# Altium schematic symbol library BIblioteka.SchLib: 66 symbols (part 2 of 3)
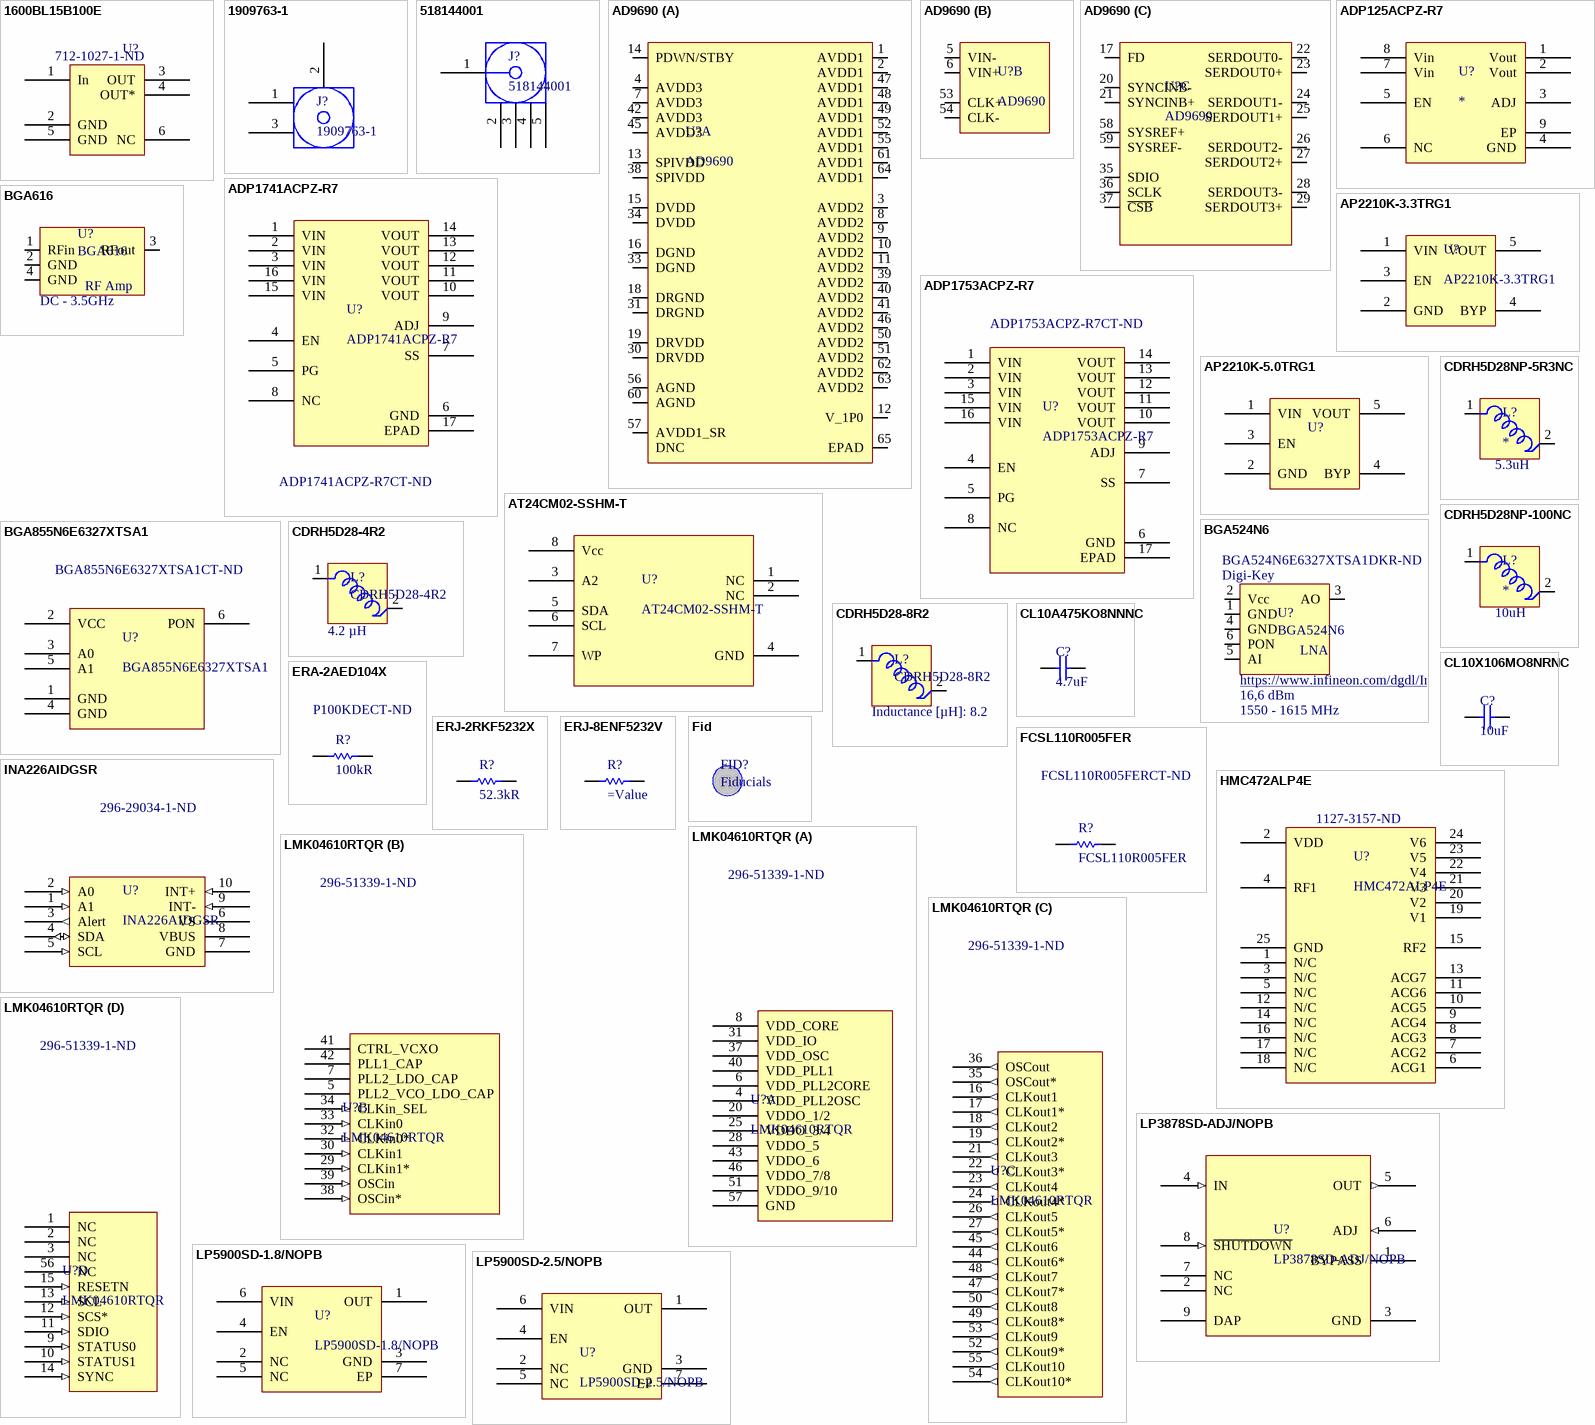
[diagram p3: symbols 1600BL15B100E to LP5900SD-2.5/NOPB]

## LP5900SD-1.8/NOPB
designator U?
Ultra Low Noise, 150MA Linear Regulator For Rf/analog Circuits, 6 Pin Llp; Manufacturer 1: Texas Instruments; Output Voltage: 1.8V; Min Input Voltage: 2.5V; Max Input Voltage: 5.5V; Dropout Voltage: 150mV; Number of Outputs: 1; Polarity: Positive; Quiescent Current: 50uA; Output Voltage Accuracy: 2%; Output Type: Fixed; Supplier 1: Digi-Key; Manufacturer Part Number 1: LP5900SD-1.8/NOPB; Stock 1: 10846; Pricing 1: 1=0.77000, 10=0.68000, 100=0.52120, 500=0.41200 (USD); RoHS: Yes; Mount: Surface Mount; Number of Pins: 6; Min Operating Temperature: -40°C; Max Operating Temperature: 125°C; Output Current: 150mA; Package Quantity: 1000; Nominal Output Voltage: 1.8V; Packaging: Tape and Reel; Max Output Current: 150mA; Accuracy: 2%; Length: 2.2mm; Height: 0.8mm; Width: 2.5mm; Radiation Hardening: No; REACH SVHC: No SVHC; Lead Free: Lead Free; ComponentLink1URL: https://datasheet.ciiva.com/6598/lp5900-6598182.pdf?src-supplier=Digi-Key; ComponentLink1Description: https://datasheet.ciiva.com/6598/lp5900-6598182.pdf?src-supplier=Digi-Key; ComponentLink2URL: https://datasheet.ciiva.com/6598/lp5900-6598185.pdf?src-supplier=Digi-Key; ComponentLink2Description: https://datasheet.ciiva.com/6598/lp5900-6598185.pdf?src-supplier=Digi-Key; ComponentLink3URL: https://datasheet.ciiva.com/26175/lp5900-26175289.pdf?src-supplier=Avnet+Europe; ComponentLink3Description: https://datasheet.ciiva.com/26175/lp5900-26175289.pdf?src-supplier=Avnet+Europe; ComponentLink4URL: https://datasheet.ciiva.com/6598/lp5900-6598187.pdf?src-supplier=Digi-Key; ComponentLink4Description: https://datasheet.ciiva.com/6598/lp5900-6598187.pdf?src-supplier=Digi-Key; ComponentLink5URL: https://datasheet.ciiva.com/28643/1772310-28643116.pdf?src-supplier=Element14; ComponentLink5Description: https://datasheet.ciiva.com/28643/1772310-28643116.pdf?src-supplier=Element14; ComponentLink6URL: https://datasheet.ciiva.com/14278/lp5900-14278125.pdf?src-supplier=Avnet; ComponentLink6Description: https://datasheet.ciiva.com/14278/lp5900-14278125.pdf?src-supplier=Avnet; ComponentLink7URL: https://datasheet.ciiva.com/22678/1772310-22678013.pdf?src-supplier=Element14; ComponentLink7Description: https://datasheet.ciiva.com/22678/1772310-22678013.pdf?src-supplier=Element14; Supplier Part Number 1: LP5900SD-1.8/NOPBCT-ND
footprint LP5900 (PSON, 6-Leads, Body 2.10x2.50mm, Pitch 0.65mm, Thermal Pad 1.20x0.75mm, IPC High Density)
pins: 1 OUT, 2 NC, 3 GND, 4 EN, 5 NC, 6 VIN, 7 EP

## LP5900SD-2.5/NOPB
designator U?
TEXAS INSTRUMENTS   LP5900SD-2.5/NOPB   LDO, FIXED, 2.5V, 0.15A, WSON-6; Output Current: 150mA; Max Input Voltage: 5.5V; Dropout Voltage: 80mV; Number of Outputs: 1; Polarity: Positive; Quiescent Current: 50uA; Accuracy: 2%; Supplier 1: Digi-Key; Manufacturer 1: Texas Instruments; Manufacturer Part Number 1: LP5900SD-2.5/NOPB; Stock 1: 11364; Pricing 1: 1=0.77000, 10=0.68000, 100=0.52120, 500=0.41200 (USD); RoHS: Yes; Mount: Surface Mount; Number of Pins: 6; Contact Plating: Tin; Min Operating Temperature: -40°C; Max Operating Temperature: 125°C; Output Voltage: 2.5V; Nominal Output Voltage: 2.5V; Min Input Voltage: 2.5V; Packaging: Tape and Reel; Max Output Current: 150mA; Output Voltage Accuracy: 2%; Output Type: Fixed; Length: 2.2mm; Height: 0.8mm; Width: 2.5mm; REACH SVHC: No SVHC; Lead Free: Lead Free; ComponentLink1URL: https://datasheet.ciiva.com/49046/1896251-49046519.pdf?src-supplier=Element14; ComponentLink1Description: https://datasheet.ciiva.com/49046/1896251-49046519.pdf?src-supplier=Element14; Supplier Part Number 1: LP5900SD-2.5/NOPBCT-ND
footprint LP5900 (PSON, 6-Leads, Body 2.10x2.50mm, Pitch 0.65mm, Thermal Pad 1.20x0.75mm, IPC High Density)
pins: 1 OUT, 2 NC, 3 GND, 4 EN, 5 NC, 6 VIN, 7 EP

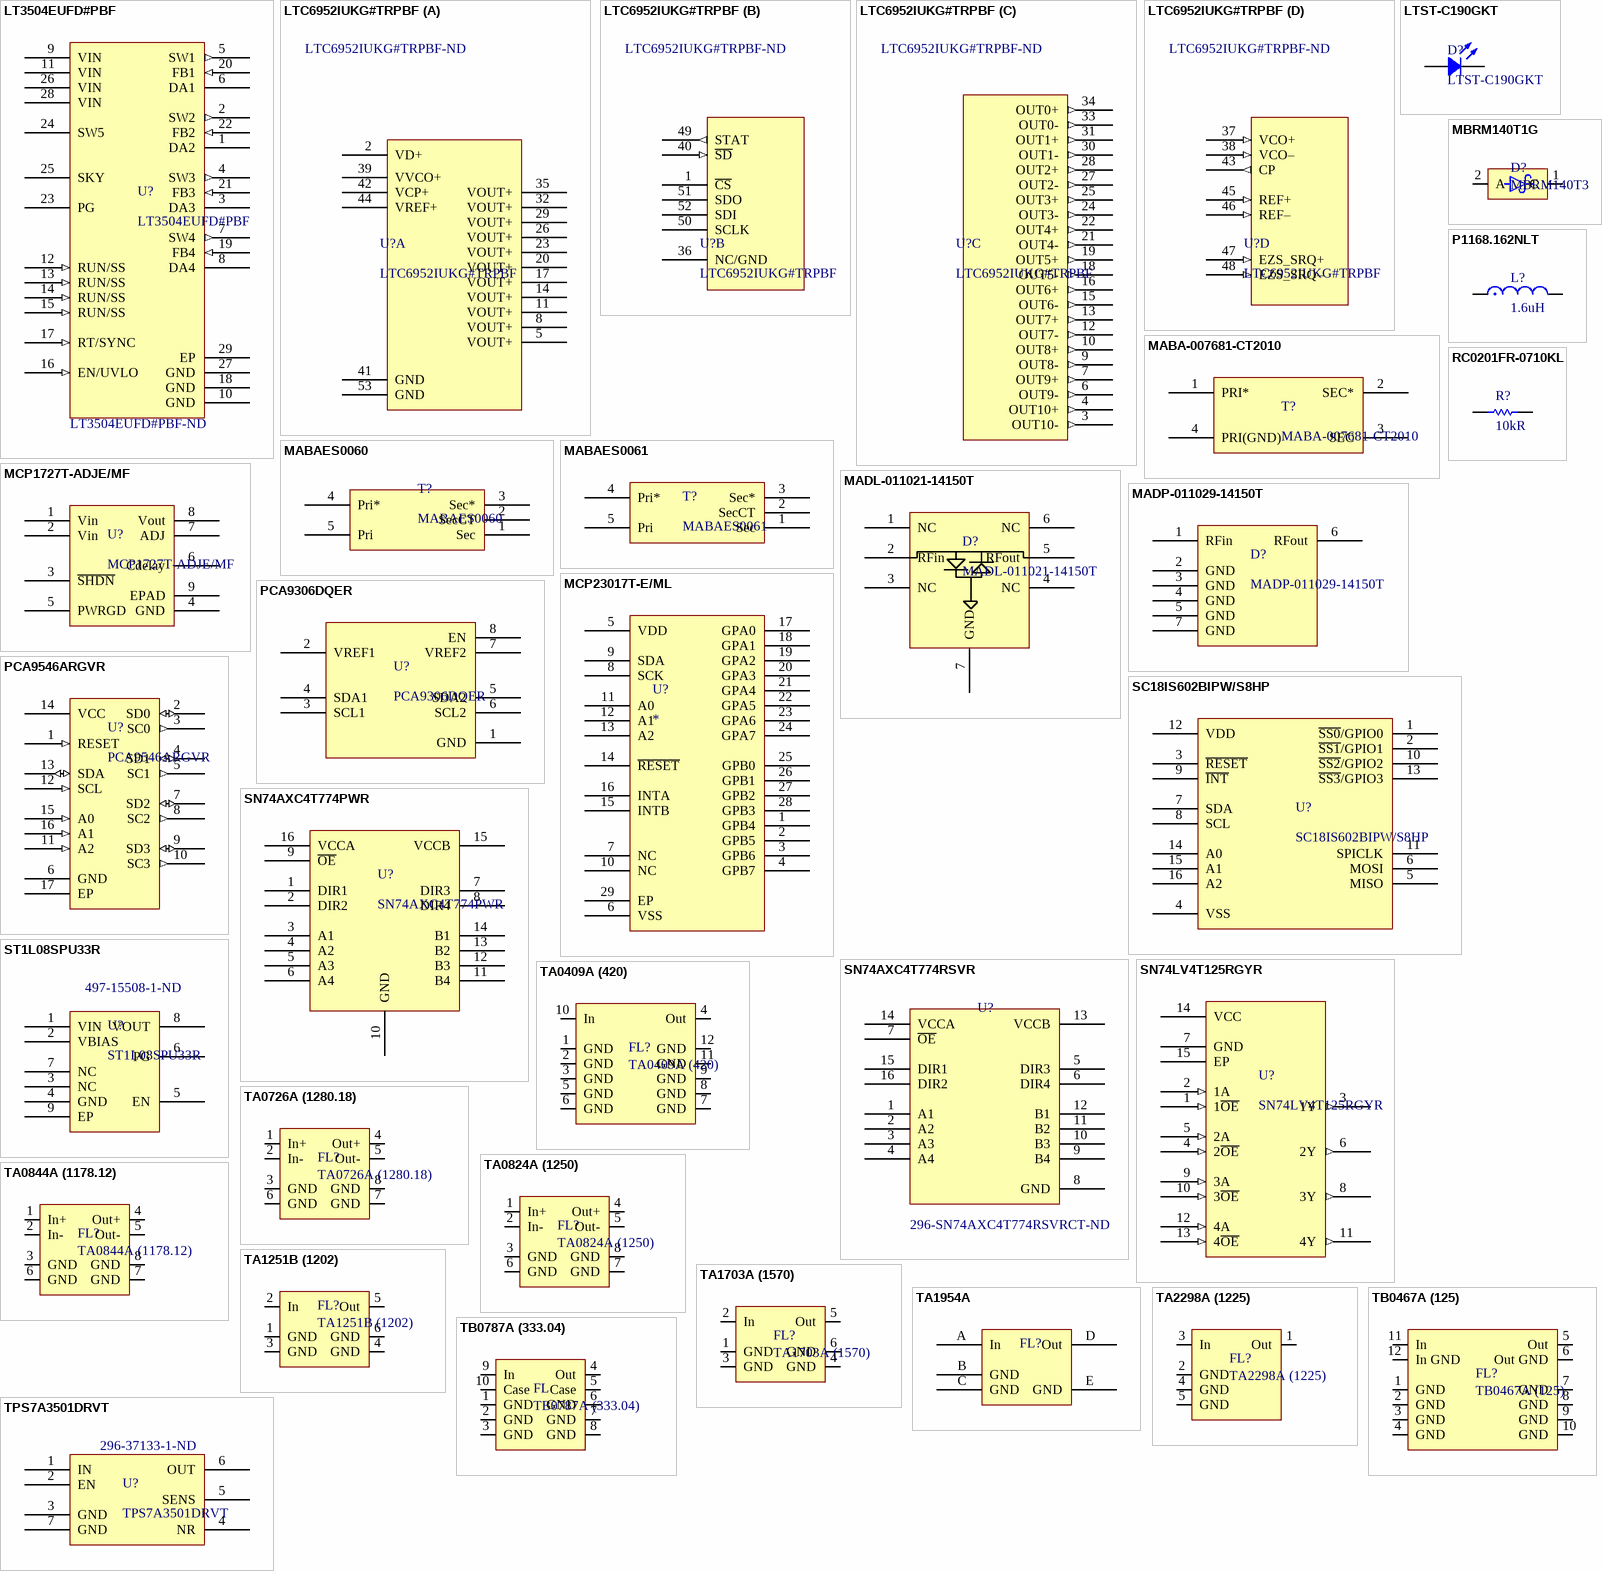
[diagram p1: symbols LT3504EUFD#PBF to TPS7A3501DRVT]

## LT3504EUFD#PBF
designator U?  Supplier Part Number 1: LT3504EUFD#PBF-ND
LINEAR TECHNOLOGY         LT3504EUFD#PBF             BUCK, QUAD, 3.2/40V, 1A, 2.2MHZ, 28QFN; Manufacturer: Analog Devices / Linear Technology; Output Voltage: 40V; Min Input Voltage: 3.2V; Number of Outputs: 4; Switching Frequency: 2.1MHz; Synchronous Rectifier: No; Output Type: Adjustable; Supplier 1: Digi-Key; Manufacturer Part Number: LT3504EUFD#PBF; Stock 1: 1751; Pricing 1: 1 = 8,49000, 25 = 5,63840, 100 = 4,66200, 250 = 4,42892, 500 = 4,32900 (USD); RoHS: Yes; Case/Package: QFN; Number of Pins: 28; Min Operating Temperature: -40°C; Max Operating Temperature: 125°C; Package Quantity: 73; Packaging: Rail/Tube; Output Current: 1A; Current - Output 1: 1A; Current - Output 2: 1A; Voltage - Output 1: 40V; Voltage - Output 2: 40V; REACH SVHC: No SVHC; Lead Free: Lead Free; ComponentLink1URL: https://datasheet.ciiva.com/6192/1732075-6192640.pdf?src-supplier=Farnell; ComponentLink1Description: https://datasheet.ciiva.com/6192/1732075-6192640.pdf?src-supplier=Farnell; ComponentLink2URL: https://datasheet.ciiva.com/7363/1732075-7363817.pdf?src-supplier=Newark; ComponentLink2Description: https://datasheet.ciiva.com/7363/1732075-7363817.pdf?src-supplier=Newark
footprint LT3504 (UFD Package  28-Lead Plastic QFN (4mm × 5mm)  (Reference LTC DWG # 05-08-1712 Rev B))
pins: 1 DA2, 2 SW2 (out), 3 DA3, 4 SW3 (out), 5 SW1 (out), 6 DA1, 7 SW4 (out), 8 DA4, 9 VIN, 10 GND, 11 VIN, 12 RUN/SS (in), 13 RUN/SS (in), 14 RUN/SS (in), 15 RUN/SS (in), 16 EN/UVLO (in), 17 RT/SYNC (in), 18 GND, 19 FB4 (in), 20 FB1 (in), 21 FB3 (in), 22 FB2 (in), 23 PG (oc), 24 SW5, 25 SKY, 26 VIN, 27 GND, 28 VIN, 29 EP

## LTC6952IUKG#TRPBF
designator U?  Supplier Part Number 1: LTC6952IUKG#TRPBF-ND
.050 X .050 C.L. FEMALE IDC ASSE; Manufacturer: Analog Devices; Supplier 1: Digi-Key; Manufacturer Part Number: LTC6952IUKG#TRPBF; Stock 1: 0; Pricing 1: 2000 = 19,86493 (USD); RoHS: No; Number of Pins: 52
footprint LTC6952 (PQFN, 52-Leads, Body 7,00x8,00mm, Pitch 0,50mm, Thermal Pad 5,70x6,70mm, IPC High Density)
part A pins: 2 VD+ (power), 5 VOUT+ (power), 8 VOUT+ (power), 11 VOUT+ (power), 14 VOUT+ (power), 17 VOUT+ (power), 20 VOUT+ (power), 23 VOUT+ (power), 26 VOUT+ (power), 29 VOUT+ (power), 32 VOUT+ (power), 35 VOUT+ (power), 39 VVCO+ (power), 41 GND, 42 VCP+ (power), 44 VREF+ (power), 53 GND
part B pins: 1 ~{CS}, 36 NC/GND, 40 ~{SD} (in), 49 STAT (out), 50 SCLK, 51 SDO, 52 SDI
part C pins: 3 OUT10- (out), 4 OUT10+ (out), 6 OUT9- (out), 7 OUT9+ (out), 9 OUT8- (out), 10 OUT8+ (out), 12 OUT7- (out), 13 OUT7+ (out), 15 OUT6- (out), 16 OUT6+ (out), 18 OUT5- (out), 19 OUT5+ (out), 21 OUT4- (out), 22 OUT4+ (out), 24 OUT3- (out), 25 OUT3+ (out), 27 OUT2- (out), 28 OUT2+ (out), 30 OUT1- (out), 31 OUT1+ (out), 33 OUT0- (out), 34 OUT0+ (out)
part D pins: 37 VCO+ (in), 38 VCO– (in), 43 CP (out), 45 REF+ (in), 46 REF– (in), 47 EZS_SRQ+ (in), 48 EZS_SRQ– (in)

## LTST-C190GKT
designator D?
LED,  LTST-C190GKT; Manufacturer 1: Vishay Lite-On; Color: Green; Lens Color: Colorless; Luminous Intensity: 6mcd; Forward Voltage: 2.1V; Viewing Angle: 130°; Lens Style: Clear,Diffused,Colorless,Rectangular; Forward Current: 30mA; Power Rating: 100mW; Dominant Wavelength: 569nm; Test Current: 10mA; Lens Transparency: Clear; Number of Elements: 1; Wavelength: 565nm; Voltage: 2V; Reverse Voltage: 5V; Supplier 1: Digi-Key; Manufacturer Part Number 1: LTST-C190GKT; Stock 1: 908158; Pricing 1: 1=0.26000, 10=0.18800, 100=0.08880, 500=0.05922, 1000=0.04639 (USD); RoHS: Yes; Mount: Surface Mount; Case/Package: 0603; Number of Pins: 2; Case Code (Metric): 1608; Case Code (Imperial): 0603; Min Operating Temperature: -55°C; Max Operating Temperature: 85°C; Package Quantity: 1; Packaging: Tape and Reel; Illumination Color: Green; Power Dissipation: 100mW; Number of LEDs: 1; Length: 1.6mm; Height: 0.8mm; Width: 0.8mm; Depth: 0.8mm; Radiation Hardening: No; Lead Free: Lead Free; ComponentLink1URL: https://datasheet.ciiva.com/11775/0900766b80dc02a6-11775616.pdf?src-supplier=RSComponents; ComponentLink1Description: https://datasheet.ciiva.com/11775/0900766b80dc02a6-11775616.pdf?src-supplier=RSComponents; ComponentLink2URL: https://datasheet.ciiva.com/2109/ltst-c190gkt-2109985.pdf?src-supplier=Digi-Key; ComponentLink2Description: https://datasheet.ciiva.com/2109/ltst-c190gkt-2109985.pdf?src-supplier=Digi-Key; ComponentLink3URL: https://datasheet.ciiva.com/16392/lite-on20ltst-c190gkt-16392818.pdf?src-supplier=Future+Electronics; ComponentLink3Description: https://datasheet.ciiva.com/16392/lite-on20ltst-c190gkt-16392818.pdf?src-supplier=Future+Electronics; ComponentLink4URL: https://datasheet.ciiva.com/12403/lite-on-ltst-c190gkt-187204-12403884.pdf?src-supplier=Mouser; ComponentLink4Description: https://datasheet.ciiva.com/12403/lite-on-ltst-c190gkt-187204-12403884.pdf?src-supplier=Mouser; ComponentLink5URL: https://datasheet.ciiva.com/2109/ltst-c190gkt-2109986.pdf?src-supplier=Digi-Key; ComponentLink5Description: https://datasheet.ciiva.com/2109/ltst-c190gkt-2109986.pdf?src-supplier=Digi-Key; ComponentLink6URL: https://datasheet.ciiva.com/2109/ltst-c190gkt-2109987.pdf?src-supplier=Digi-Key; ComponentLink6Description: https://datasheet.ciiva.com/2109/ltst-c190gkt-2109987.pdf?src-supplier=Digi-Key; Supplier Part Number 1: 160-1183-1-ND
footprint LED 0603/1608 GREEN (Chip Diode, 2-Leads, Body 1.60x0.80mm, IPC Medium Density)
pins: 1, 2

## MABA-007681-CT2010
designator T?
RF Transformer 1.414: 1 4Term. SMD; Manufacturer: TE Connectivity MA-COM; Current Rating: 600mA; Power Rating: 250mW; Supplier 1: Digi-Key; Manufacturer Part Number: MABA-007681-CT2010; Stock 1: 1606; Pricing 1: 1 = 2,84000, 10 = 2,27000, 25 = 1,84480, 50 = 1,79740, 100 = 1,75010, 250 = 1,70280 (USD); RoHS: Yes; Mount: Surface Mount; Case/Package: SMD/SMT; Number of Pins: 4; Min Operating Temperature: -40°C; Max Operating Temperature: 85°C; Packaging: Tape and Reel; Package Quantity: 900; Turns Ratio: 1.414:1; Termination: SMD/SMT; Max DC Current: 600mA; Length: 7.11mm; Height: 3.33mm; Width: 6.35mm; Depth: 6.35mm; Radiation Hardening: No; ComponentLink1URL: https://datasheet.ciiva.com/29655/maba-007681-ct2010-29655680.pdf?src-supplier=Digi-Key; ComponentLink1Description: https://datasheet.ciiva.com/29655/maba-007681-ct2010-29655680.pdf?src-supplier=Digi-Key; ComponentLink2URL: https://datasheet.ciiva.com/15154/getdatasheetpartid-721834-15154840.pdf?src-supplier=Verical; ComponentLink2Description: https://datasheet.ciiva.com/15154/getdatasheetpartid-721834-15154840.pdf?src-supplier=Verical; ComponentLink3URL: https://datasheet.ciiva.com/3296/maba-007681-ct2010-3296009.pdf?src-supplier=Avnet; ComponentLink3Description: https://datasheet.ciiva.com/3296/maba-007681-ct2010-3296009.pdf?src-supplier=Avnet; Supplier Part Number 1: 1465-1304-1-ND
footprint MABA-007681-CT2010
pins: 1 PRI*, 2 SEC*, 3 SEC, 4 PRI(GND)

## MABAES0060
designator T?
RF Transformer 1: 1CT 0.3MHz to 200MHz Surface Mount; Manufacturer 1: TE Connectivity MA-COM; Power Rating: 500mW; Turns Ratio: 1:1; Max DC Current: 500mA; Insertion Loss: 1.5dB; Lead/Base Style: Gull Wing; Supplier 1: Digi-Key; Manufacturer Part Number 1: MABAES0060; Stock 1: 4134; Pricing 1: 1=2.44000, 10=1.95400, 25=1.58720, 50=1.54660, 100=1.50590, 250=1.46520, 500=1.45300, 1000=1.28612 (USD); RoHS: Yes; Mount: Surface Mount; Case/Package: SMD/SMT; Number of Pins: 5; Min Operating Temperature: -40°C; Max Operating Temperature: 85°C; Packaging: Tape and Reel; Package Quantity: 2000; Termination: SMD/SMT; Length: 3.81mm; Height: 2.67mm; Width: 3.81mm; Depth: 3.81mm; Radiation Hardening: No; Lead Free: Lead Free; ComponentLink1URL: https://datasheet.ciiva.com/3295/ds-mabaes0060-v5-3295936.pdf?src-supplier=Avnet; ComponentLink1Description: https://datasheet.ciiva.com/3295/ds-mabaes0060-v5-3295936.pdf?src-supplier=Avnet; ComponentLink2URL: https://datasheet.ciiva.com/29655/mabaes0060-v6-29655622.pdf?src-supplier=Digi-Key; ComponentLink2Description: https://datasheet.ciiva.com/29655/mabaes0060-v6-29655622.pdf?src-supplier=Digi-Key; ComponentLink3URL: https://datasheet.ciiva.com/4550/ds-mabaes0060-v5-14473-4550847.pdf?src-supplier=Mouser; ComponentLink3Description: https://datasheet.ciiva.com/4550/ds-mabaes0060-v5-14473-4550847.pdf?src-supplier=Mouser; ComponentLink4URL: https://datasheet.ciiva.com/29655/mabaes0060-v6-29655623.pdf?src-supplier=Digi-Key; ComponentLink4Description: https://datasheet.ciiva.com/29655/mabaes0060-v6-29655623.pdf?src-supplier=Digi-Key; ComponentLink5URL: https://datasheet.ciiva.com/29655/mabaes0060-v6-29655624.pdf?src-supplier=Digi-Key; ComponentLink5Description: https://datasheet.ciiva.com/29655/mabaes0060-v6-29655624.pdf?src-supplier=Digi-Key; Supplier Part Number 1: 1465-1317-1-ND
footprint MABAES0060 (SOTFL, 5-Leads, Body 3.81x2.81mm, Pitch 1.27mm, IPC High Density)
pins: 1 Sec, 2 SecCT, 3 Sec*, 4 Pri*, 5 Pri

## MABAES0061
designator T?
RF Transformer 1: 2 2MHz to 800MHz Surface Mount; Manufacturer: TE Connectivity MA-COM; Power Rating: 250mW; Turns Ratio: 1:2; Max DC Current: 240mA; Insertion Loss: 3dB; Supplier 1: Digi-Key; Manufacturer Part Number: MABAES0061; Stock 1: 6284; Pricing 1: 1 = 2,11000, 10 = 1,69000, 25 = 1,37280, 50 = 1,33760, 100 = 1,30240, 250 = 1,26720, 500 = 1,25664, 1000 = 1,11232 (USD); RoHS: Yes; Mount: Surface Mount; Case/Package: SMD/SMT; Number of Pins: 5; Min Operating Temperature: -40°C; Max Operating Temperature: 85°C; Packaging: Tape and Reel; Package Quantity: 2000; Termination: SMD/SMT; Length: 3.81mm; Height: 2.67mm; Width: 3.81mm; Depth: 3.81mm; Radiation Hardening: No; Lead Free: Lead Free; ComponentLink1URL: https://datasheet.ciiva.com/3295/mabaes0061-3295937.pdf?src-supplier=Avnet; ComponentLink1Description: https://datasheet.ciiva.com/3295/mabaes0061-3295937.pdf?src-supplier=Avnet; ComponentLink2URL: https://datasheet.ciiva.com/4550/mabaes0061-39711-4550870.pdf?src-supplier=Mouser; ComponentLink2Description: https://datasheet.ciiva.com/4550/mabaes0061-39711-4550870.pdf?src-supplier=Mouser; ComponentLink3URL: https://datasheet.ciiva.com/29655/mabaes0061-v6-29655692.pdf?src-supplier=Digi-Key; ComponentLink3Description: https://datasheet.ciiva.com/29655/mabaes0061-v6-29655692.pdf?src-supplier=Digi-Key; ComponentLink4URL: https://datasheet.ciiva.com/15154/getdatasheetpartid-470951-15154795.pdf?src-supplier=Verical; ComponentLink4Description: https://datasheet.ciiva.com/15154/getdatasheetpartid-470951-15154795.pdf?src-supplier=Verical; Supplier Part Number 1: 1465-1318-1-ND
footprint MABAES0061 (6-SMD (5 Leads), Flat Lead)
pins: 1 Sec, 2 SecCT, 3 Sec*, 4 Pri*, 5 Pri

## MADL-011021-14150T
designator D?
DIODE SCHOTTKY/LIMITER 6TDFN; Manufacturer: TE Connectivity MA-COM; Supplier 1: Digi-Key; Manufacturer Part Number: MADL-011021-14150T; Stock 1: 7736; Pricing 1: 1 = 2,43000, 10 = 2,18400, 25 = 2,06000, 100 = 1,75510, 250 = 1,64800, 500 = 1,44200, 1000 = 1,19480 (USD); RoHS: Yes; Packaging: Tape and Reel; ComponentLink1URL: http://cdn.macom.com//datasheets/MADL-011021-14150T.pdf?src-supplier=Digi-Key; ComponentLink1Description: http://cdn.macom.com//datasheets/MADL-011021-14150T.pdf?src-supplier=Digi-Key; Supplier Part Number 1: 1465-1736-1-ND
footprint MADP-011029-14150 (PSON, 6-Leads, Body 1,20x1,50mm, Pitch 0,40mm, Thermal Pad 0,85x0,47mm, IPC High Density)
pins: 1 NC, 2 RFin, 3 NC, 4 NC, 5 RFout, 6 NC, 7 GND

## MADP-011029-14150T
designator D?
PIN Diodes .5-12GHz Ls=.4nH 100W Pk; Manufacturer: TE Connectivity MA-COM; Forward Voltage: 900mV; Forward Current: 250mA; Reverse Voltage (DC): 400V; Max Power Dissipation: 7.5W; Element Configuration: Single; Diode Type: PIN - Single; Supplier 1: Digi-Key; Manufacturer Part Number: MADP-011029-14150T; Stock 1: 6865; Pricing 1: 1 = 2,89000, 10 = 2,59800, 25 = 2,45640, 100 = 2,12900, 250 = 2,01984, 500 = 1,81238, 1000 = 1,52852 (USD); RoHS: Yes; Case/Package: DFN; Weight: 0.000744oz; Min Operating Temperature: -65°C; Max Operating Temperature: 125°C; Packaging: Tape and Reel; Package Quantity: 3000; Termination: Solder; Max Current Rating: 250mA; ComponentLink1URL: https://datasheet.ciiva.com/24021/madp-011029-14150t-257701-24021442.pdf?src-supplier=Mouser; ComponentLink1Description: https://datasheet.ciiva.com/24021/madp-011029-14150t-257701-24021442.pdf?src-supplier=Mouser; Supplier Part Number 1: 1465-1738-1-ND
footprint MADP-011029-14150 (PSON, 6-Leads, Body 1,20x1,50mm, Pitch 0,40mm, Thermal Pad 0,85x0,47mm, IPC High Density)
pins: 1 RFin, 2 GND, 3 GND, 4 GND, 5 GND, 6 RFout, 7 GND

## MBRM140T1G
designator D?, comment MBRM140T3
Supplier Part Number 1: MBRM140T3GOSCT-ND; Supplier 1: Digi-Key
footprint CASE 457 (CASE 457-04, MBRM140T1G)
pins: 1 C, 2 A

## MCP1727T-ADJE/MF
designator U?
IC REG LDO ADJ 1.5A 8DFN; Manufacturer 1: Microchip; Number of Outputs: 1; Min Input Voltage: 2.3V; Max Input Voltage: 6V; Output Voltage: 5V; Dropout Voltage: 330mV; Input Bias Current: 120uA; Reference Voltage: 410mV; Polarity: Positive; Accuracy: 0.5%; Output Type: Adjustable; Supplier 1: Digi-Key; Manufacturer Part Number 1: MCP1727T-ADJE/MF; Stock 1: 9419; Pricing 1: 1=0.84000, 25=0.71080, 100=0.63860 (USD); RoHS: Yes; Mount: Surface Mount; Case/Package: DFN; Contact Plating: Tin,Matte; Min Operating Temperature: -40°C; Max Operating Temperature: 125°C; Package Quantity: 3300; Output Current: 1.5A; Packaging: Tape and Reel; Max Output Current: 1.5A; Quiescent Current: 120uA; Radiation Hardening: No; Lead Free: Lead Free; ComponentLink1URL: https://datasheet.ciiva.com/2057/21999b-2057048.pdf?src-supplier=Digi-Key; ComponentLink1Description: https://datasheet.ciiva.com/2057/21999b-2057048.pdf?src-supplier=Digi-Key; ComponentLink2URL: https://datasheet.ciiva.com/8237/jp027822-8237704.pdf?src-supplier=Avnet; ComponentLink2Description: https://datasheet.ciiva.com/8237/jp027822-8237704.pdf?src-supplier=Avnet; ComponentLink3URL: https://datasheet.ciiva.com/17364/jp027822-17364137.pdf?src-supplier=Avnet+Europe; ComponentLink3Description: https://datasheet.ciiva.com/17364/jp027822-17364137.pdf?src-supplier=Avnet+Europe; Supplier Part Number 1: MCP1727T-ADJE/MFCT-ND
footprint MCP1727T-ADJE/MF (SON, 8-Leads, Body 3.00x3.00mm, Pitch 0.65mm, Thermal Pad 2.40x1.60mm, IPC High Density)
pins: 1 Vin, 2 Vin, 3 ~{SHDN}, 4 GND, 5 PWRGD, 6 Cdelay, 7 ADJ, 8 Vout, 9 EPAD

## MCP23017T-E/ML
designator U?
IC I/O EXPANDER I2C 16B 28QFN; Manufacturer: Microchip; Manufacturer Part Number: MCP23017T-E/ML; Output Current: 25mA; Interface: I2C,Serial; Operating Supply Voltage: 5.5V; Number of I/Os: 16; Power Dissipation: 700mW; Max Frequency: 1.7MHz; Supplier 1: Digi-Key; Stock 1: 7016; Pricing 1: 1 = 1,45000, 25 = 1,21560, 100 = 1,10210 (USD); RoHS: Yes; Case/Package: QFN; Contact Plating: Tin,Matte; Min Operating Temperature: -40°C; Max Operating Temperature: 125°C; Package Quantity: 1600; Packaging: Tape and Reel; Frequency: 1.7MHz; Number of Bits: 16; Lead Free: Lead Free; ComponentLink1URL: https://datasheet.ciiva.com/1780/21952b-1780757.pdf?src-supplier=Digi-Key; ComponentLink1Description: https://datasheet.ciiva.com/1780/21952b-1780757.pdf?src-supplier=Digi-Key; ComponentLink2URL: https://datasheet.ciiva.com/16454/filehandler-aspxddocname-en023709-16454263.pdf?src-supplier=Future+Electronics; ComponentLink2Description: https://datasheet.ciiva.com/16454/filehandler-aspxddocname-en023709-16454263.pdf?src-supplier=Future+Electronics; ComponentLink3URL: https://datasheet.ciiva.com/8128/21952b-8128584.pdf?src-supplier=Avnet; ComponentLink3Description: https://datasheet.ciiva.com/8128/21952b-8128584.pdf?src-supplier=Avnet; Supplier Part Number 1: MCP23017T-E/MLCT-ND
footprint MCP23017/MCP23S17 (QFN, 28-Leads, Body 6,00x6,00mm, Pitch 0,65mm, Thermal Pad 4,25x4,25mm, IPC High Density)
pins: 1 GPB4, 2 GPB5, 3 GPB6, 4 GPB7, 5 VDD, 6 VSS, 7 NC, 8 SCK, 9 SDA, 10 NC, 11 A0, 12 A1, 13 A2, 14 ~{RESET}, 15 INTB, 16 INTA, 17 GPA0, 18 GPA1, 19 GPA2, 20 GPA3, 21 GPA4, 22 GPA5, 23 GPA6, 24 GPA7, 25 GPB0, 26 GPB1, 27 GPB2, 28 GPB3, 29 EP

## P1168.162NLT
designator L?, comment 1.6uH
Fixed Inductors SHD DRUM CORE IND; Manufacturer: Pulse; Manufacturer Part Number: P1168.162NLT; Tolerance: 30%; Shielding: Shielded; Current Rating: 8.5A; Saturation Current: 10A; Max DC Current: 11A; DC Resistance (DCR): 6.3mR; Self Resonant Frequency: 40MHz; Test Frequency: 100kHz; Current: 4.6A; Supplier 1: Digi-Key; Stock 1: 2082; Pricing 1: 1 = 2,06000, 10 = 1,89800, 100 = 1,32830 (USD); RoHS: Yes; Mount: Surface Mount; Case/Package: Nonstandard; Min Operating Temperature: -40°C; Max Operating Temperature: 130°C; Package Quantity: 500; Packaging: Tape and Reel; Inductance: 1.6uH; Termination: SMD/SMT; Composition: Wirewound; Length: 0.482inch; Height: 4.5mm; Width: 12.24mm; Height - Seated (Max): 0.177inch; ComponentLink1URL: https://datasheet.ciiva.com/8499/+spm2007-25-8499190.pdf?src-supplier=Avnet; ComponentLink1Description: https://datasheet.ciiva.com/8499/+spm2007-25-8499190.pdf?src-supplier=Avnet; Supplier Part Number 1: 553-1950-1-ND
footprint P1168 (Precision Wire Wound Inductor, 2-Leads, Body 12,24x12,24mm, IPC High Density)
pins: 1, 2

## PCA9306DQER
designator U?
TEXAS INSTRUMENTS   PCA9306DQER.   IC, SMBus, 5V, X2SON-8; Number of Channels: 2; Propagation Delay: 0.3ns; Min Supply Voltage: 0uV; Logic Function: Translator; Turn-On Delay Time: 1.4ns; Low Level Output Current: 128mA; Output Type: I2C; Supplier 1: Digi-Key; Manufacturer 1: Texas Instruments; Manufacturer Part Number 1: PCA9306DQER; Stock 1: 25002; Pricing 1: 1=0,67000, 10=0,59100, 100=0,45340, 500=0,35844, 1000=0,28675 (USD); RoHS: Yes; Number of Pins: 8; Min Operating Temperature: -40°C; Max Operating Temperature: 85°C; Max Supply Voltage: 5V; Package Quantity: 1; Number of Outputs: 2; Number of Bits: 2; Packaging: Tape and Reel; Length: 1.45mm; Height: 0.35mm; Width: 1.05mm; Radiation Hardening: No; REACH SVHC: No SVHC; Lead Free: Lead Free; ComponentLink1URL: https://datasheet.ciiva.com/22631/1719693-22631024.pdf?src-supplier=Element14; ComponentLink1Description: https://datasheet.ciiva.com/22631/1719693-22631024.pdf?src-supplier=Element14; ComponentLink2URL: https://datasheet.ciiva.com/1899/pca9306-1899328.pdf?src-supplier=Digi-Key; ComponentLink2Description: https://datasheet.ciiva.com/1899/pca9306-1899328.pdf?src-supplier=Digi-Key; ComponentLink3URL: https://datasheet.ciiva.com/15095/getdatasheetpartid-306496-15095555.pdf?src-supplier=Verical; ComponentLink3Description: https://datasheet.ciiva.com/15095/getdatasheetpartid-306496-15095555.pdf?src-supplier=Verical; ComponentLink4URL: https://datasheet.ciiva.com/1504/1862428-1504149.pdf?src-supplier=Element14; ComponentLink4Description: https://datasheet.ciiva.com/1504/1862428-1504149.pdf?src-supplier=Element14; ComponentLink5URL: https://datasheet.ciiva.com/1899/pca9306-1899326.pdf?src-supplier=Digi-Key; ComponentLink5Description: https://datasheet.ciiva.com/1899/pca9306-1899326.pdf?src-supplier=Digi-Key; ComponentLink6URL: https://datasheet.ciiva.com/14287/pca9306-14287374.pdf?src-supplier=Avnet; ComponentLink6Description: https://datasheet.ciiva.com/14287/pca9306-14287374.pdf?src-supplier=Avnet; ComponentLink7URL: https://datasheet.ciiva.com/14287/pca9306-14287470.pdf?src-supplier=Avnet; ComponentLink7Description: https://datasheet.ciiva.com/14287/pca9306-14287470.pdf?src-supplier=Avnet; ComponentLink8URL: https://datasheet.ciiva.com/1899/pca9306-1899327.pdf?src-supplier=Digi-Key; ComponentLink8Description: https://datasheet.ciiva.com/1899/pca9306-1899327.pdf?src-supplier=Digi-Key; ComponentLink9URL: https://datasheet.ciiva.com/26041/pca9306-26041014.pdf?src-supplier=Avnet+Europe; ComponentLink9Description: https://datasheet.ciiva.com/26041/pca9306-26041014.pdf?src-supplier=Avnet+Europe; Supplier Part Number 1: 296-27957-1-ND
footprint PCA9306 (8-XFDFN, Body 1,40x1,00mm, Pitch 0,35mm, IPC High Density)
pins: 1 GND, 2 VREF1, 3 SCL1, 4 SDA1, 5 SDA2, 6 SCL2, 7 VREF2, 8 EN

## PCA9546ARGVR
designator U?
IC I2C/SMBUS SWITCH 4CH 16-VQFN; Manufacturer 1: Texas Instruments; Number of Inputs: 4; Number of Outputs: 1; Max Supply Voltage: 5.5V; Min Supply Voltage: 2.3V; Logic Function: Multiplexer; Bandwidth: 400kHz; Propagation Delay: 1ns; Max Power Dissipation: 400mW; On-State Resistance: 45R; Operating Supply Current: 3uA; Supplier 1: Digi-Key; Manufacturer Part Number 1: PCA9546ARGVR; Stock 1: 3293; Pricing 1: 1=1.95000, 10=1.75200, 100=1.40850, 500=1.15720, 1000=0.95883 (USD); RoHS: Yes; Case/Package: VQFN; Number of Pins: 16; Contact Plating: Gold; Min Operating Temperature: -40°C; Max Operating Temperature: 85°C; Packaging: Tape and Reel; Package Quantity: 1; Number of Channels: 4; Power Dissipation: 400mW; Max Frequency: 400kHz; Nominal Supply Current: 3uA; Quiescent Current: 3uA; Radiation Hardening: No; Lead Free: Lead Free; ComponentLink1URL: https://datasheet.ciiva.com/15087/getdatasheetpartid-194420-15087222.pdf?src-supplier=Verical; ComponentLink1Description: https://datasheet.ciiva.com/15087/getdatasheetpartid-194420-15087222.pdf?src-supplier=Verical; ComponentLink2URL: https://datasheet.ciiva.com/26839/pca9546argvr-26839996.pdf?src-supplier=IIIC; ComponentLink2Description: https://datasheet.ciiva.com/26839/pca9546argvr-26839996.pdf?src-supplier=IIIC; ComponentLink3URL: https://datasheet.ciiva.com/1784/pca9546a-1784308.pdf?src-supplier=Digi-Key; ComponentLink3Description: https://datasheet.ciiva.com/1784/pca9546a-1784308.pdf?src-supplier=Digi-Key; ComponentLink4URL: https://datasheet.ciiva.com/1784/pca9546a-1784309.pdf?src-supplier=Digi-Key; ComponentLink4Description: https://datasheet.ciiva.com/1784/pca9546a-1784309.pdf?src-supplier=Digi-Key; ComponentLink5URL: https://datasheet.ciiva.com/1784/pca9546a-1784310.pdf?src-supplier=Digi-Key; ComponentLink5Description: https://datasheet.ciiva.com/1784/pca9546a-1784310.pdf?src-supplier=Digi-Key; ComponentLink6URL: https://datasheet.ciiva.com/29886/pca9546a-29886952.pdf?src-supplier=Avnet; ComponentLink6Description: https://datasheet.ciiva.com/29886/pca9546a-29886952.pdf?src-supplier=Avnet; ComponentLink7URL: https://datasheet.ciiva.com/14285/pca9546a-14285823.pdf?src-supplier=Avnet; ComponentLink7Description: https://datasheet.ciiva.com/14285/pca9546a-14285823.pdf?src-supplier=Avnet; Supplier Part Number 1: 296-21771-1-ND
footprint PCA9546A (RGV (S-PVQFN-N16))
pins: 1 RESET (in), 2 SD0 (io), 3 SC0 (out), 4 SD1 (io), 5 SC1 (out), 6 GND, 7 SD2 (io), 8 SC2 (out), 9 SD3 (io), 10 SC3 (out), 11 A2 (in), 12 SCL (in), 13 SDA (io), 14 VCC, 15 A0 (in), 16 A1 (in), 17 EP

## RC0201FR-0710KL
designator R?, comment 10kR
RES SMD 10K OHM 1% 1/20W 0201; Manufacturer: Yageo; Manufacturer Part Number: RC0201FR-0710KL; Power Rating: 50mW; Voltage Rating: 25V; Temperature Coefficient: 200ppm/°C; Supplier 1: Digi-Key; Stock 1: 10643192; Pricing 1: 1 = 0,10000, 10 = 0,04200, 100 = 0,01710, 1000 = 0,00768, 2500 = 0,00666, 5000 = 0,00551 (USD); RoHS: Yes; Case/Package: 0201; Number of Pins: 2; Weight: 6E-06oz; Case Code (Imperial): 0201; Case Code (Metric): 0603; Contact Plating: Tin,Matte; Min Operating Temperature: -55°C; Max Operating Temperature: 125°C; Resistance: 10kR; Tolerance: 1%; Packaging: Tape and Reel; Package Quantity: 1; Termination: SMD/SMT; Composition: Thick Film; Number of Terminations: 2; Military Standard: Not; Max Power Dissipation: 50mW; Voltage Rating (DC): 25V; Features: Moisture Resistant; Working Voltage: 25V; Length: 0.6mm; Height: 0.01inch; Width: 0.3mm; Depth: 0.3mm; Radiation Hardening: No; REACH SVHC: No SVHC; Lead Free: Lead Free; ComponentLink1URL: https://datasheet.ciiva.com/2467/pyu-r-int-thick-7-2467109.pdf?src-supplier=Digi-Key; ComponentLink1Description: https://datasheet.ciiva.com/2467/pyu-r-int-thick-7-2467109.pdf?src-supplier=Digi-Key; ComponentLink2URL: https://datasheet.ciiva.com/2467/pyu-r-int-thick-7-2467110.pdf?src-supplier=Digi-Key; ComponentLink2Description: https://datasheet.ciiva.com/2467/pyu-r-int-thick-7-2467110.pdf?src-supplier=Digi-Key; ComponentLink3URL: https://datasheet.ciiva.com/7660/1421516-7660807.pdf?src-supplier=Element14; ComponentLink3Description: https://datasheet.ciiva.com/7660/1421516-7660807.pdf?src-supplier=Element14; ComponentLink4URL: https://datasheet.ciiva.com/8891/pyu-rc0201-51-rohs-l-8-8891384.pdf?src-supplier=Avnet; ComponentLink4Description: https://datasheet.ciiva.com/8891/pyu-rc0201-51-rohs-l-8-8891384.pdf?src-supplier=Avnet; ComponentLink5URL: https://datasheet.ciiva.com/26829/getdatasheetpartid-421074-26829851.pdf?src-supplier=Verical; ComponentLink5Description: https://datasheet.ciiva.com/26829/getdatasheetpartid-421074-26829851.pdf?src-supplier=Verical; ComponentLink6URL: https://datasheet.ciiva.com/46391/1421516-46391339.pdf?src-supplier=Element14; ComponentLink6Description: https://datasheet.ciiva.com/46391/1421516-46391339.pdf?src-supplier=Element14; ComponentLink7URL: https://datasheet.ciiva.com/2467/pyu-r-int-thick-7-2467111.pdf?src-supplier=Digi-Key; ComponentLink7Description: https://datasheet.ciiva.com/2467/pyu-r-int-thick-7-2467111.pdf?src-supplier=Digi-Key; ComponentLink8URL: https://datasheet.ciiva.com/28405/pyu-rc0201-51-rohs-l-8-28405609.pdf?src-supplier=Avnet+Europe; ComponentLink8Description: https://datasheet.ciiva.com/28405/pyu-rc0201-51-rohs-l-8-28405609.pdf?src-supplier=Avnet+Europe; ComponentLink9URL: https://datasheet.ciiva.com/16855/pyu-rc0201-51-rohs-l-8-16855789.pdf?src-supplier=Avnet+Europe; ComponentLink9Description: https://datasheet.ciiva.com/16855/pyu-rc0201-51-rohs-l-8-16855789.pdf?src-supplier=Avnet+Europe; Supplier Part Number 1: 311-10.0KMCT-ND
footprint RESC0603X02L (Chip Resistor, 2-Leads, Body 0,60x0,30mm, IPC High Density)
pins: 1, 2

## SC18IS602BIPW/S8HP
designator U?
IC BRIDGE SPI/I2C 16TSSOP; Manufacturer 1: NXP Semiconductors; Supplier 1: Digi-Key; Manufacturer Part Number 1: SC18IS602BIPW/S8HP; Stock 1: 121; Pricing 1: 1=2.76000, 10=2.47600, 100=2.02860, 500=1.72690, 1000=1.45642 (USD); RoHS: No; ComponentLink1URL: https://www.nxp.com/docs/en/data-sheet/SC18IS602B.pdf?src-supplier=Digi-Key; ComponentLink1Description: https://www.nxp.com/docs/en/data-sheet/SC18IS602B.pdf?src-supplier=Digi-Key; Supplier Part Number 1: 568-13691-1-ND
footprint SC18IS602B (TSSOP16: plastic thin shrink small outline package; 16 leads; body width 4.4 mm)
pins: 1 ~{SS0}/GPIO0, 2 ~{SS1}/GPIO1, 3 ~{RESET}, 4 VSS, 5 MISO, 6 MOSI, 7 SDA, 8 SCL, 9 ~{INT}, 10 ~{SS2}/GPIO2, 11 SPICLK, 12 VDD, 13 ~{SS3}/GPIO3, 14 A0, 15 A1, 16 A2

## SN74AXC4T774PWR
designator U?
Manufacturer 1: Texas Instruments; Supplier 1: Digi-Key; Manufacturer Part Number 1: SN74AXC4T774PWR; Stock 1: 2000; Pricing 1: 1=1,14000, 10=1,01500, 100=0,79120, 500=0,65364, 1000=0,51603 (USD); RoHS: No; Supplier Part Number 1: 296-SN74AXC4T774PWRCT-ND
footprint SN74AXC4T774PWR (TSOP,PW0016A, 16-Leads, Body 5,00x4,40mm, Pitch 0,65mm, IPC High Density)
pins: 1 DIR1, 2 DIR2, 3 A1, 4 A2, 5 A3, 6 A4, 7 DIR3, 8 DIR4, 9 ~{OE}, 10 GND, 11 B4, 12 B3, 13 B2, 14 B1, 15 VCCB, 16 VCCA

## SN74AXC4T774RSVR
designator U?  Supplier Part Number 1: 296-SN74AXC4T774RSVRCT-ND  (hidden comment: SN74AXC4T774RSVR)
4-bit dual-supply bus transceiver with 3-state outputs and independent direction control inputs 16-UQFN -40 to 125; Manufacturer: Texas Instruments; Supplier 1: Digi-Key; Manufacturer Part Number: SN74AXC4T774RSVR; RoHS: No; Category: Buffers, Drivers and Transceivers; Stock 1: 2179; Pricing 1: 1=1,21000, 10=1,08600, 25=1,03040, 100=0,84640, 250=0,79120, 500=0,69920, 1000=0,55200 (USD)
footprint 16-UGFN (QFN, 16-Leads, Body 1,80x2,60mm, Pitch 0,40mm, IPC High Density)
pins: 1 A1, 2 A2, 3 A3, 4 A4, 5 DIR3, 6 DIR4, 7 ~{OE}, 8 GND, 9 B4, 10 B3, 11 B2, 12 B1, 13 VCCB, 14 VCCA, 15 DIR1, 16 DIR2

## SN74LV4T125RGYR
designator U?
level shifter Automotive 14-Pin VQFN EP T/R; Manufacturer 1: Texas Instruments; Number of Elements: 4; Number of Bits per Element: 1; High Level Output Current: 16mA; Logic Function: Buffer,Inverting,Translator; Quiescent Current: 2uA; Supplier 1: Digi-Key; Manufacturer Part Number 1: SN74LV4T125RGYR; Stock 1: 74112; Pricing 1: 1=1.15000, 10=1.03000, 100=0.80310, 500=0.66342, 1000=0.52376 (USD); RoHS: Yes; Mount: Surface Mount; Case/Package: VQFN; Number of Pins: 14; Contact Plating: Gold; Min Operating Temperature: -40°C; Max Operating Temperature: 125°C; Packaging: Tape and Reel; Low Level Output Current: 16mA; Number of Bits: 4; Radiation Hardening: No; Lead Free: Lead Free; ComponentLink1URL: https://datasheet.ciiva.com/48438/sn74lv4t125-48438269.pdf?src-supplier=Avnet; ComponentLink1Description: https://datasheet.ciiva.com/48438/sn74lv4t125-48438269.pdf?src-supplier=Avnet; Supplier Part Number 1: 296-40546-1-ND
footprint SN74LV4T125RGYR (14-VFQFN Exposed Pad)
pins: 1 1~{OE} (in), 2 1A (in), 3 1Y (out), 4 2~{OE} (in), 5 2A (in), 6 2Y (out), 7 GND, 8 3Y (out), 9 3A (in), 10 3~{OE} (in), 11 4Y (out), 12 4A (in), 13 4~{OE} (in), 14 VCC, 15 EP

## ST1L08SPU33R
designator U?  Supplier Part Number 1: 497-15508-1-ND
IC REG LINEAR 3.3V 800MA 8DFN; Manufacturer: STMicroelectronics; Dropout Voltage: 100mV; Number of Regulators: 1; Supplier 1: Digi-Key; Manufacturer Part Number: ST1L08SPU33R; Stock 1: 2497; Pricing 1: 1 = 0,72000, 10 = 0,63200, 100 = 0,48470, 500 = 0,38316, 1000 = 0,30653 (USD); RoHS: Yes; Mount: Surface Mount; Case/Package: DFN; Min Operating Temperature: -40°C; Max Operating Temperature: 125°C; Packaging: Tape and Reel; Output Voltage: 3.3V; Output Current: 800mA; Lead Free: Lead Free; ComponentLink1URL: http://www.st.com/st-web-ui/static/active/en/resource/technical/document/datasheet/DM00123507.pdf?src-supplier=Avnet; ComponentLink1Description: http://www.st.com/st-web-ui/static/active/en/resource/technical/document/datasheet/DM00123507.pdf?src-supplier=Avnet; ComponentLink2URL: http://www.st.com/content/ccc/resource/technical/document/datasheet/5f/25/d1/3f/f8/25/44/07/DM00123507.pdf/files/DM00123507.pdf/jcr:content/translations/en.DM00123507.pdf?src-supplier=Digi-Key; ComponentLink2Description: http://www.st.com/content/ccc/resource/technical/document/datasheet/5f/25/d1/3f/f8/25/44/07/DM00123507.pdf/files/DM00123507.pdf/jcr:content/translations/en.DM00123507.pdf?src-supplier=Digi-Key
footprint ST1L08 (DFN8 (2x3 mm) package outline)
pins: 1 VIN, 2 VBIAS, 3 NC, 4 GND, 5 EN, 6 PG, 7 NC, 8 VOUT, 9 EP

## TA0409A (420)
designator FL?
SAW filter 420MHz; BW: 10MHz; IL (max): 3.5dB; In Pow (max): 10 dBm; Impedance In, Out: 50 Ohm; Fc: 420MHz
footprint Tai-Saw_7x5p12 (TA0409A, 12-Pins, Body 5,00x7,00mmx1,70mm, Pitch 1,27mm, IPC Medium Density)
pins: 1 GND, 2 GND, 3 GND, 4 Out, 5 GND, 6 GND, 7 GND, 8 GND, 9 GND, 10 In, 11 GND, 12 GND

## TA0726A (1280.18)
designator FL?
SAW Filter 1280.16MHz; Impedance In, Out: 150 Ohm; IL (max): 5 dB; BW: 40; In Power (max): 10 dBm; Fc: 1280.18
footprint Tai-Saw_3x3p8 (TA0726A, 8-Pins, Body 3,00x3,00mmx1,40mm, Pitch 1,20mm, IPC Medium Density)
pins: 1 In+, 2 In-, 3 GND, 4 Out+, 5 Out-, 6 GND, 7 GND, 8 GND

## TA0824A (1250)
designator FL?
SAW Filter 1250MHz
footprint Tai-Saw_3x3p8 (TA0726A, 8-Pins, Body 3,00x3,00mmx1,40mm, Pitch 1,20mm, IPC Medium Density)
pins: 1 In+, 2 In-, 3 GND, 4 Out+, 5 Out-, 6 GND, 7 GND, 8 GND

## TA0844A (1178.12)
designator FL?
SAW Filter 1178.12MHz; BW: 40 MHz; IL (max): 5dB; Impedance In, Out: 150 Ohm; In Power (max): 10dBm; Fc: 1178.12
footprint Tai-Saw_3x3p8 (TA0726A, 8-Pins, Body 3,00x3,00mmx1,40mm, Pitch 1,20mm, IPC Medium Density)
pins: 1 In+, 2 In-, 3 GND, 4 Out+, 5 Out-, 6 GND, 7 GND, 8 GND

## TA1251B (1202)
designator FL?
SAW Filter 1202 MHz; BW: 30MHz; IL (max): 3.3 dB; In Power (max): 20 dBm; Impedance In, Out: 50 Ohm; Fc: 1202MHz
footprint Tai-Saw_3x3p6 (TA1251B, 6-Pins, Body 3,00x3,00mmx1,40mm, Pitch 1,20mm, IPC Medium Density)
pins: 1 GND, 2 In, 3 GND, 4 GND, 5 Out, 6 GND

## TA1703A (1570)
designator FL?
SAW Filter 1570 MHz; BW: 80 MHz; IL (max): 4.2 dB; Impedance In, Out: 50 Ohm; In Power (max): 10 dBm; Fc: 1570 MHz
footprint Tai-Saw_3x3p6 (TA1251B, 6-Pins, Body 3,00x3,00mmx1,40mm, Pitch 1,20mm, IPC Medium Density)
pins: 1 GND, 2 In, 3 GND, 4 GND, 5 Out, 6 GND

## TA1954A
designator FL?  (value not drawn)
SAW Filter 1582.470MHz; Center Frequency: 1582.47 MHz; Zs: 50 Ohm; Maximum Input Power: 15 dBm; Zl: 50 Ohm; ComponentLink1Description: Datasheet; ComponentLink1URL: https://www.golledge.com/media/2798/mp07322.pdf
footprint TA1954A (5-Leads, Body 0,90x1,10mm)
pins: A In, B GND, C GND, D Out, E GND

## TA2298A (1225)
designator FL?
SAW Filter 1225 MHz GPS L2; BW: 80 MHz; IL (max): 2.8 dB; Impedance In, Out: 50; In Power (max): 10 dBm; Fc: 1225 MHz
footprint Tai-Saw_1.4x1.1p5 (TA2298A, 6-Leads, Body 1,40x1,10mm, Pitch 0,57mm/0,50mm, IPC Medium Density)
pins: 1 Out, 2 GND, 3 In, 4 GND, 5 GND

## TB0467A (125)
designator FL?
IF SAW Filter 125MHz; BW: 30 MHz; IL (max): 13.5 dB; Impedance In, Out: 50 Ohm (LC); In Power (max): 10 dBm; Fc: 125 MHz
footprint Tai-Saw_13,3x6,5p12 (TB0467A, 12-Pins, Body 13,30x6,5mmx1,40mm, Pitch 2,54mm, IPC Medium Density)
pins: 1 GND, 2 GND, 3 GND, 4 GND, 5 Out, 6 Out GND, 7 GND, 8 GND, 9 GND, 10 GND, 11 In, 12 In GND

## TB0787A (333.04)
designator FL
IF SAW Filter 333.04 MHz; BW: 7MHz; FC: 333.04; IL (max): 15dB; Impedance In, Out: 50Ohm(LC); In Power (max): 10 dBm
footprint Tai-Saw_7x5p10 (TA0409A, 10-Pins, Body 5,00x7,00mmx1,70mm, Pitch 1,27mm, IPC Medium Density)
pins: 1 GND, 2 GND, 3 GND, 4 Out, 5 Case, 6 GND, 7 GND, 8 GND, 9 In, 10 Case

## TPS7A3501DRVT
designator U?  Supplier Part Number 1: 296-37133-1-ND
TEXAS INSTRUMENTS         TPS7A3501DRVT            LDO Voltage Regulator, Adjustable, 1.71V to 5V in, 330mV drop, 1.21V to 4.5V/1A out, SON-6; Output Current: 1A; Number of Outputs: 1; Output Voltage: 4.5V; Min Current Limit: 1.1A; Polarity: Positive; Quiescent Current: 2.2mA; Supplier 1: Digi-Key; Manufacturer: Texas Instruments; Manufacturer Part Number: TPS7A3501DRVT; Stock 1: 4410; Pricing 1: 1 = 2,31000, 10 = 2,07200, 100 = 1,66520 (USD); RoHS: Yes; Mount: Surface Mount; Number of Pins: 6; Weight: 0.000342oz; Min Operating Temperature: -40°C; Max Operating Temperature: 125°C; Min Input Voltage: 1.71V; Max Input Voltage: 5V; Dropout Voltage: 330mV; Package Quantity: 250; Packaging: Tape and Reel; Max Output Current: 1A; Number of Regulators: 1; Min Output Voltage: 1.21V; Max Output Voltage: 4.5V; Output Type: Adjustable; Radiation Hardening: No; REACH SVHC: No SVHC; Lead Free: Lead Free; ComponentLink1URL: https://datasheet.ciiva.com/28435/1776766-28435910.pdf?src-supplier=Element14; ComponentLink1Description: https://datasheet.ciiva.com/28435/1776766-28435910.pdf?src-supplier=Element14; ComponentLink2URL: https://datasheet.ciiva.com/29569/tps7a3501-29569542.pdf?src-supplier=Digi-Key; ComponentLink2Description: https://datasheet.ciiva.com/29569/tps7a3501-29569542.pdf?src-supplier=Digi-Key; ComponentLink3URL: https://datasheet.ciiva.com/29569/tps7a3501-29569543.pdf?src-supplier=Digi-Key; ComponentLink3Description: https://datasheet.ciiva.com/29569/tps7a3501-29569543.pdf?src-supplier=Digi-Key; ComponentLink4URL: https://datasheet.ciiva.com/29569/tps7a3501-29569544.pdf?src-supplier=Digi-Key; ComponentLink4Description: https://datasheet.ciiva.com/29569/tps7a3501-29569544.pdf?src-supplier=Digi-Key; ComponentLink5URL: https://datasheet.ciiva.com/30016/tps7a3501-30016008.pdf?src-supplier=Avnet; ComponentLink5Description: https://datasheet.ciiva.com/30016/tps7a3501-30016008.pdf?src-supplier=Avnet
footprint TPS7A3501 (6-WDFN Exposed Pad)
pins: 1 IN, 2 EN, 3 GND, 4 NR, 5 SENS, 6 OUT, 7 GND

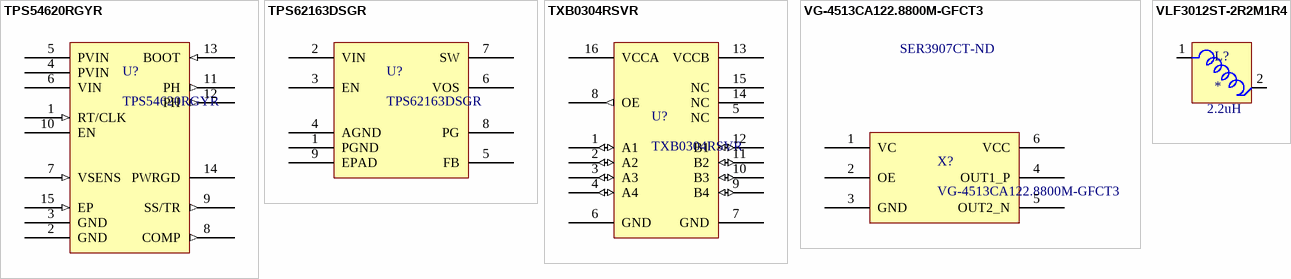
[diagram p2: symbols TPS54620RGYR to VLF3012ST-2R2M1R4]

## TPS54620RGYR
designator U?
IC REG BUCK ADJ 6A SYNC 14VQFN; Manufacturer: Texas Instruments; Output Voltage: 15V; Switching Frequency: 1.6MHz; Number of Outputs: 1; Max Input Voltage: 17V; Min Input Voltage: 4.5V; Synchronous Rectifier: Yes; Min Output Voltage: 800mV; Quiescent Current: 600uA; Output Type: Adjustable; Supplier 1: Digi-Key; Manufacturer Part Number: TPS54620RGYR; Stock 1: 62317; Pricing 1: 1 = 4,78000, 10 = 4,29200, 100 = 3,51690, 500 = 2,99386, 1000 = 2,52494 (USD); RoHS: Yes; Case/Package: VQFN; Number of Pins: 14; Weight: 0.001136oz; Contact Plating: Gold; Min Operating Temperature: -40°C; Max Operating Temperature: 150°C; Output Current: 6A; Package Quantity: 3000; Packaging: Tape and Reel; Max Output Current: 6A; Max Output Voltage: 15V; Operating Supply Voltage: 17V; Radiation Hardening: No; REACH SVHC: No SVHC; Lead Free: Lead Free; ComponentLink1URL: https://datasheet.ciiva.com/26896/tps54620rgyr-26896323.pdf?src-supplier=IIIC; ComponentLink1Description: https://datasheet.ciiva.com/26896/tps54620rgyr-26896323.pdf?src-supplier=IIIC; ComponentLink2URL: https://datasheet.ciiva.com/2026/tps54620-2026358.pdf?src-supplier=Digi-Key; ComponentLink2Description: https://datasheet.ciiva.com/2026/tps54620-2026358.pdf?src-supplier=Digi-Key; ComponentLink3URL: https://datasheet.ciiva.com/3220/tps54620-3220246.pdf?src-supplier=Avnet; ComponentLink3Description: https://datasheet.ciiva.com/3220/tps54620-3220246.pdf?src-supplier=Avnet; ComponentLink4URL: https://datasheet.ciiva.com/2026/tps54620-2026359.pdf?src-supplier=Digi-Key; ComponentLink4Description: https://datasheet.ciiva.com/2026/tps54620-2026359.pdf?src-supplier=Digi-Key; ComponentLink5URL: https://datasheet.ciiva.com/3220/tps54620-3220247.pdf?src-supplier=Avnet; ComponentLink5Description: https://datasheet.ciiva.com/3220/tps54620-3220247.pdf?src-supplier=Avnet; ComponentLink6URL: https://datasheet.ciiva.com/2026/tps54620-2026360.pdf?src-supplier=Digi-Key; ComponentLink6Description: https://datasheet.ciiva.com/2026/tps54620-2026360.pdf?src-supplier=Digi-Key; ComponentLink7URL: https://datasheet.ciiva.com/26101/tps54620-26101512.pdf?src-supplier=Avnet+Europe; ComponentLink7Description: https://datasheet.ciiva.com/26101/tps54620-26101512.pdf?src-supplier=Avnet+Europe; ComponentLink8URL: https://datasheet.ciiva.com/22716/1781687-22716299.pdf?src-supplier=Element14; ComponentLink8Description: https://datasheet.ciiva.com/22716/1781687-22716299.pdf?src-supplier=Element14; ComponentLink9URL: https://datasheet.ciiva.com/28541/1874770-28541819.pdf?src-supplier=Element14; ComponentLink9Description: https://datasheet.ciiva.com/28541/1874770-28541819.pdf?src-supplier=Element14; ComponentLink10URL: https://datasheet.ciiva.com/16536/tps54620-16536207.pdf?src-supplier=Avnet+Asia; ComponentLink10Description: https://datasheet.ciiva.com/16536/tps54620-16536207.pdf?src-supplier=Avnet+Asia; ComponentLink11URL: https://datasheet.ciiva.com/41462/001014868-da-01-en-ic-reg-buck-syn-tps54620rgyr-vqfn-14-tid-41462714.pdf?src-supplier=Conrad; ComponentLink11Description: https://datasheet.ciiva.com/41462/001014868-da-01-en-ic-reg-buck-syn-tps54620rgyr-vqfn-14-tid-41462714.pdf?src-supplier=Conrad; Supplier Part Number 1: 296-24554-1-ND
footprint TPS54620RGYR (14-VFQFN Exposed Pad)
pins: 1 RT/CLK (in), 2 GND, 3 GND, 4 PVIN, 5 PVIN, 6 VIN, 7 VSENS (in), 8 COMP (out), 9 SS/TR (out), 10 EN, 11 PH (out), 12 PH (out), 13 BOOT (in), 14 PWRGD, 15 EP (in)

## TPS62163DSGR
designator U?
IC REG BUCK 5V 1A SYNC 8WSON; Manufacturer 1: Texas Instruments; Switching Frequency: 2.25MHz; Number of Outputs: 1; Max Input Voltage: 17V; Min Input Voltage: 3V; Synchronous Rectifier: Yes; Quiescent Current: 17uA; Output Type: Fixed; Output Configuration: Positive; Supplier 1: Digi-Key; Manufacturer Part Number 1: TPS62163DSGR; Stock 1: 19908; Pricing 1: 1=1.79000, 10=1.61000, 100=1.29440, 500=1.06348, 1000=0.88117 (USD); RoHS: Yes; Case/Package: SOIC; Number of Pins: 8; Contact Plating: Gold; Min Operating Temperature: -40°C; Max Operating Temperature: 125°C; Packaging: Tape and Reel; Package Quantity: 1; Output Voltage: 5V; Output Current: 1A; Max Output Current: 1A; Min Output Voltage: 5V; Max Output Voltage: 5V; Operating Supply Voltage: 17V; REACH SVHC: No SVHC; Lead Free: Lead Free; ComponentLink1URL: https://datasheet.ciiva.com/4880/slvsam2a-198231-4880752.pdf?src-supplier=Mouser; ComponentLink1Description: https://datasheet.ciiva.com/4880/slvsam2a-198231-4880752.pdf?src-supplier=Mouser; ComponentLink2URL: https://datasheet.ciiva.com/2034/tps62160-2034672.pdf?src-supplier=Digi-Key; ComponentLink2Description: https://datasheet.ciiva.com/2034/tps62160-2034672.pdf?src-supplier=Digi-Key; ComponentLink3URL: https://datasheet.ciiva.com/2034/tps62160-2034673.pdf?src-supplier=Digi-Key; ComponentLink3Description: https://datasheet.ciiva.com/2034/tps62160-2034673.pdf?src-supplier=Digi-Key; ComponentLink4URL: https://datasheet.ciiva.com/2034/tps62160-2034674.pdf?src-supplier=Digi-Key; ComponentLink4Description: https://datasheet.ciiva.com/2034/tps62160-2034674.pdf?src-supplier=Digi-Key; Supplier Part Number 1: 296-29898-1-ND
footprint TPS62163 (DSG0008A WSON - 0.8 mm max height)
pins: 1 PGND, 2 VIN, 3 EN, 4 AGND, 5 FB, 6 VOS, 7 SW, 8 PG, 9 EPAD

## TXB0304RSVR
designator U?
IC TRNSLTR BIDIRECTIONAL 16UQFN; Manufacturer 1: Texas Instruments; Nominal Supply Current: 5uA; Max Supply Voltage: 3.6V; Min Supply Voltage: 900mV; Data Rate: 140Mbps; Number of Channels: 4; Propagation Delay: 4.8ns; Logic Function: Translator; Turn-On Delay Time: 18.9ns; High Level Output Current: -20uA; Low Level Output Current: 20uA; Quiescent Current: 10uA; Supplier 1: Digi-Key; Manufacturer Part Number 1: TXB0304RSVR; Stock 1: 1758; Pricing 1: 1=1.45000, 10=1.29700, 100=1.01160, 500=0.83564, 1000=0.65972 (USD); RoHS: Yes; Mount: Surface Mount; Number of Pins: 16; Contact Plating: Gold; Min Operating Temperature: -40°C; Max Operating Temperature: 85°C; Packaging: Tape and Reel; Package Quantity: 1; Number of Bits: 4; Number of Inputs: 4; Number of Outputs: 4; Radiation Hardening: No; REACH SVHC: No SVHC; Lead Free: Lead Free; ComponentLink1URL: https://datasheet.ciiva.com/1900/txb0304-1900817.pdf?src-supplier=Digi-Key; ComponentLink1Description: https://datasheet.ciiva.com/1900/txb0304-1900817.pdf?src-supplier=Digi-Key; ComponentLink2URL: https://datasheet.ciiva.com/15096/getdatasheetpartid-490462-15096317.pdf?src-supplier=Verical; ComponentLink2Description: https://datasheet.ciiva.com/15096/getdatasheetpartid-490462-15096317.pdf?src-supplier=Verical; ComponentLink3URL: https://datasheet.ciiva.com/1900/txb0304-1900818.pdf?src-supplier=Digi-Key; ComponentLink3Description: https://datasheet.ciiva.com/1900/txb0304-1900818.pdf?src-supplier=Digi-Key; ComponentLink4URL: https://datasheet.ciiva.com/1900/txb0304-1900819.pdf?src-supplier=Digi-Key; ComponentLink4Description: https://datasheet.ciiva.com/1900/txb0304-1900819.pdf?src-supplier=Digi-Key; ComponentLink5URL: https://datasheet.ciiva.com/14287/txb0304-14287243.pdf?src-supplier=Avnet; ComponentLink5Description: https://datasheet.ciiva.com/14287/txb0304-14287243.pdf?src-supplier=Avnet; Supplier Part Number 1: 296-29681-1-ND
footprint TXB0304 (RSV0016A UQFN - 0.55 mm max height)
pins: 1 A1 (io), 2 A2 (io), 3 A3 (io), 4 A4 (io), 5 NC, 6 GND, 7 GND, 8 OE (out), 9 B4 (io), 10 B3 (io), 11 B2 (io), 12 B1 (io), 13 VCCB, 14 NC, 15 NC, 16 VCCA

## VG-4513CA122.8800M-GFCT3
designator X?  Supplier Part Number 1: SER3907CT-ND
OSC VCXO 122.88MHZ LVPECL SMD; Manufacturer: Epson; Max Supply Current: 65mA; Supplier 1: Digi-Key; Manufacturer Part Number: VG-4513CA122.8800M-GFCT3; Stock 1: 438; Pricing 1: 1 = 9,91000, 10 = 9,29000, 50 = 8,97980, 100 = 8,67020 (USD); RoHS: Yes; Mount: Surface Mount; Case/Package: SMD/SMT; Min Operating Temperature: -40°C; Max Operating Temperature: 85°C; Packaging: Tape and Reel; Frequency: 122.88MHz; Length: 0.276inch; Height: 0.071inch; Width: 0.197inch; Lead Free: Lead Free; ComponentLink1URL: https://datasheet.ciiva.com/29626/vg-4513ca-partnumber-29626986.pdf?src-supplier=Digi-Key; ComponentLink1Description: https://datasheet.ciiva.com/29626/vg-4513ca-partnumber-29626986.pdf?src-supplier=Digi-Key; ComponentLink2URL: https://datasheet.ciiva.com/29626/vg-4513ca-partnumber-29626987.pdf?src-supplier=Digi-Key; ComponentLink2Description: https://datasheet.ciiva.com/29626/vg-4513ca-partnumber-29626987.pdf?src-supplier=Digi-Key; ComponentLink3URL: https://datasheet.ciiva.com/29626/076-vg-4513ca-cb-e13ya-29626988.pdf?src-supplier=Digi-Key; ComponentLink3Description: https://datasheet.ciiva.com/29626/076-vg-4513ca-cb-e13ya-29626988.pdf?src-supplier=Digi-Key
footprint VG-4513CA (SON, 6-Leads, Body 7,00x5,00mm, Pitch 2,60mm, IPC High Density)
pins: 1 VC, 2 OE, 3 GND, 4 OUT1_P, 5 OUT2_N, 6 VCC